# Altium footprint library LMS78_0520R.PcbLib: 1 footprints
Each footprint in its own frame and in the unit in brackets; x right, y up, seen from the top. Pads: shape width x height; smd on the part's side, far side on the other; paste and mask are expansions set on the pad; w line width, h text height; cw(c..) or ccw(c..) is an arc to the next point about the centre after c.
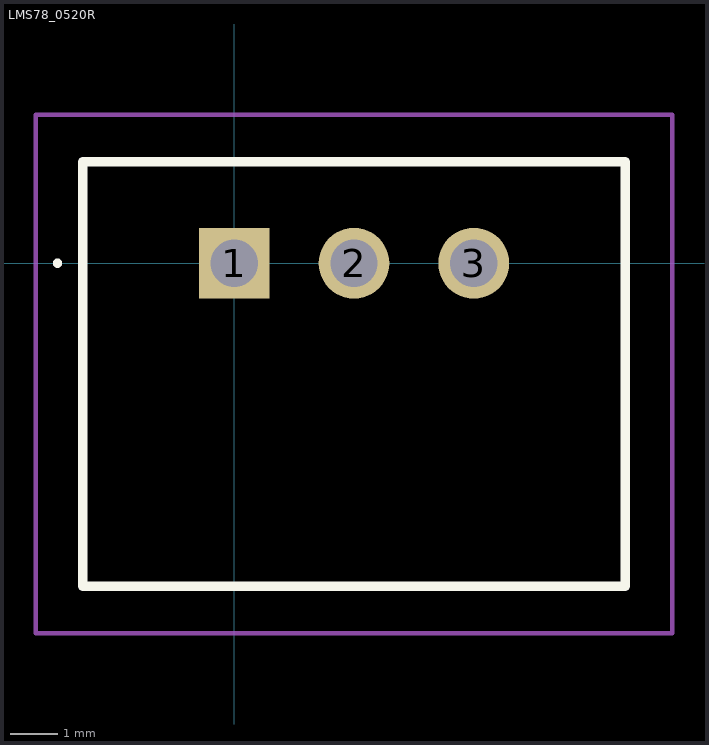
[diagram p0: the footprint, top view; thin cyan lines are the x and y axes]

## LMS78_0520R [mm]
pads (3):
  rect 1.5x1.5 hole 1: 1(0,0)
  round 1.5 hole 1: 2(2.54,0) 3(5.08,0)
Top Overlay:
  lines w0.1: -3.8,0 -3.8,0 ; -3.8,0 ccw(c-3.75,0) -3.7,0 ; -3.8,0 cw(c-3.75,0) -3.7,0 ; -3.7,0 -3.7,0
  lines w0.2: -3.21,-6.85 8.29,-6.85 8.29,2.15 -3.21,2.15 -3.21,-6.85
Mechanical 15:
  lines w0.1: -3.21,-6.85 8.29,-6.85 8.29,2.15 -3.21,2.15 -3.21,-6.85
Mechanical 20:
  lines w0.1: -4.21,-7.85 9.29,-7.85 9.29,3.15 -4.21,3.15 -4.21,-7.85